# Altium footprint library aksima_footprint.PcbLib: 83 footprints (part 4 of 6)
Each footprint in its own frame and in the unit in brackets; x right, y up, seen from the top. Pads: shape width x height; smd on the part's side, far side on the other; paste and mask are expansions set on the pad; w line width, h text height; cw(c..) or ccw(c..) is an arc to the next point about the centre after c.
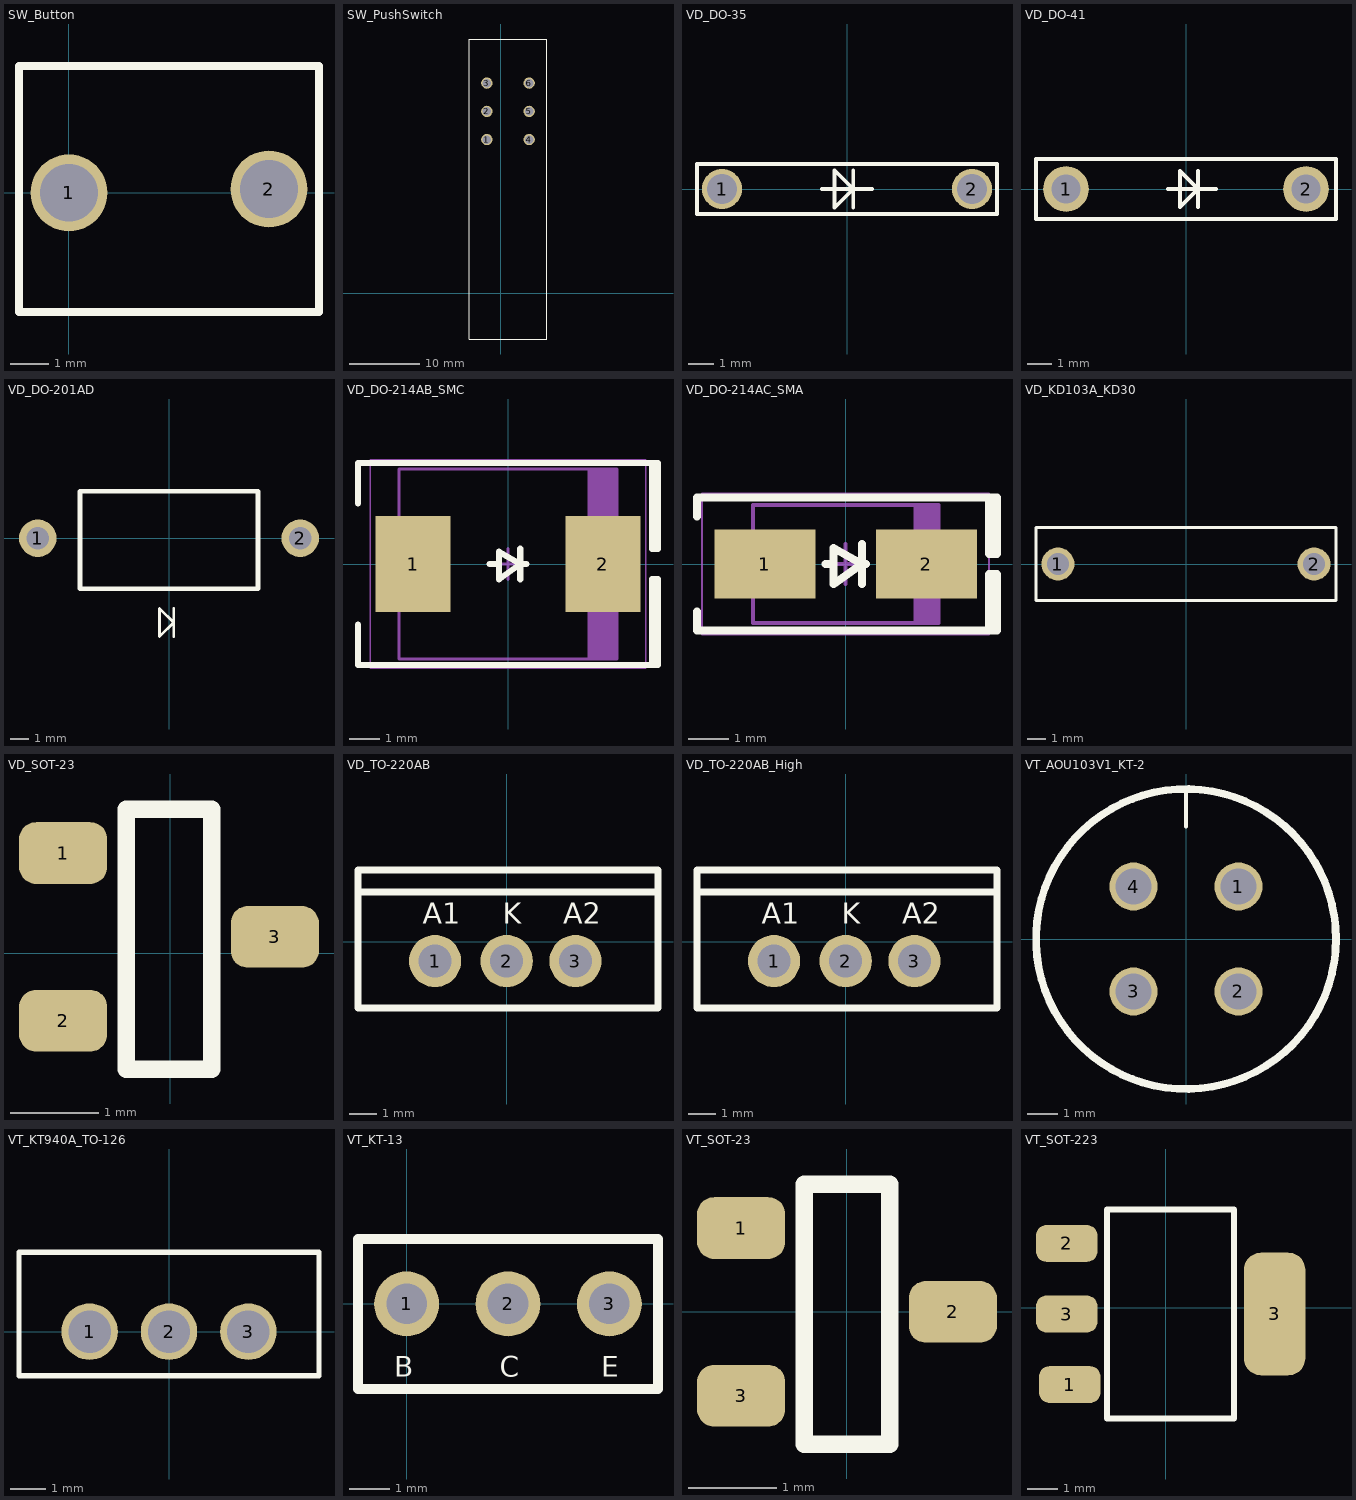
[diagram p3: the footprints below, top view; thin cyan lines are the x and y axes]

## SW_Button [mm] "Switch footprint, button"
pads (2):
  round 2 hole 1.5: 1(0,0) 2(5.2,0.1)
Top Overlay:
  lines w0.2: -1.3,-3.1 -1.3,-0.825 -1.3,0.625 -1.3,3.3 6.5,3.3 6.5,-3.1 -1.3,-3.1

## SW_PushSwitch [mm] "Switch footprint, push switch"
pads (6):
  round 1.6 hole 1.2 unplated: 1(-2,21.75) 2(-2,25.75) 3(-2,29.75) 4(4,21.75) 5(4,25.75) 6(4,29.75)
Top Overlay:
  lines w0.15: -4.5,-6.5 6.5,-6.5 6.5,36 -4.5,36 -4.5,-6.5
3D body "2 - -2.stp": height 12.5, standoff -3, extent -4,-6 6,35.5

## VD_DO-35 [mm] "Diode footprint, DO-35"
pads (2):
  round 1.6 hole 1.2: 1(-5,0) 2(5,0)
Top Overlay:
  lines w0.15: -1,0 1,0 ; 0.25,-0.75 0.25,0.75 ; -6,-1 -6,0 -6,1 6,1 6,-1 -6,-1 ; -0.5,-0.75 -0.5,0.75 0.25,0 -0.5,-0.75 ; -0.5,0 -0.5,0
3D body "DIODE-1N4148.STEP": height 1.85, standoff -2.5, extent -5.31,-0.853 5.31,0.853

## VD_DO-41 [mm] "Diode footprint, DO-41"
pads (2):
  round 1.9 hole 1.2: 1(-5,0) 2(5,0)
Top Overlay:
  lines w0.15: -0.75,0 1.25,0 ; 0.5,-0.75 0.5,0.75 ; -6.25,-1.25 6.25,-1.25 6.25,1.25 -6.25,1.25 -6.25,0.25 -6.25,-1.25 ; -0.25,-0.75 0.5,0 -0.25,0.75 -0.25,-0.75 ; -0.25,0 -0.25,0
3D body "DO-204AL-BK.stp": height 2.8, standoff -2.5, extent -5.48,-1.34 5.48,1.34

## VD_DO-201AD [mm] "Diode footprint, DO-201AD"
pads (2):
  round 2 hole 1.2: 1(-7,0) 2(7,0)
Top Overlay:
  lines w0.15: 0.25,-5.25 0.25,-3.75 ; 0.25,-4.5 -0.5,-5.25 -0.5,-3.75 0.25,-4.5 ; 0.25,-4.5 0.25,-4.5
  lines w0.254: -4.75,-2.7 4.75,-2.7 4.75,2.5 -4.75,2.5 -4.75,-2.7
3D body "DO-201AD.stp": height 5.65, standoff -3.66, extent -7.727,-2.642 7.727,2.642

## VD_DO-214AB_SMC [mm] "Molded Diode, 2-Leads, Body 6.85x5.90mm, IPC Medium Density"
height 2.62
pads (2):
  rect 2.45x3.15 smd: 1(-3.1,0) 2(3.1,0)
Top Overlay:
  lines w0.2: -4.9,-1.975 -4.9,-3.3 4.9,-3.3 4.9,-0.5 4.7,-0.5 4.7,-3.3 ; -4.9,1.975 -4.9,3.3 4.9,3.3 4.9,0.5 4.7,0.5 4.7,3.3 ; -0.6,0 -0.3,0 ; 0.4,-0.5 0.4,0.5 ; 0.6,0 0.4,0 ; 0.4,0 -0.3,0.4 -0.3,-0.5 0.4,0
Mechanical 13:
  rectangle: 2.599,-3.11 3.555,3.11
  lines w0.1: -3.555,-3.11 -3.555,3.11 3.555,3.11 3.555,-3.11 -3.555,-3.11
Mechanical 15:
  lines w0.05: -4.5,-3.4 -4.5,3.4 4.5,3.4 4.5,-3.4 -4.5,-3.4
  lines w0.1: -0.5,0 0.5,0 ; 0,-0.5 0,0.5
3D body "SMC.STEP": height 2.6, standoff 0, extent -3.97,-2.952 3.97,2.952

## VD_DO-214AC_SMA [mm] "Molded Diode, 2-Leads, Body 4.30x2.60mm, IPC Medium Density"
height 2.4
pads (2):
  rect 2.5x1.7 smd: 1(-2,0) 2(2,0)
Top Overlay:
  lines w0.2: -3.683,-1.175 -3.683,-1.651 3.75,-1.651 3.75,-0.254 3.556,-0.254 3.556,-1.651 ; -3.683,1.175 -3.683,1.651 3.75,1.651 3.75,0.254 3.556,0.254 3.556,1.651 ; -0.5,0 -0.3,0 ; 0.4,-0.5 0.4,0.5 ; 0.5,0 0.4,0 ; 0.4,0 -0.3,0.4 -0.3,-0.5 0.4,0
Mechanical 13:
  rectangle: 1.681,-1.46 2.3,1.46
  lines w0.1: -2.3,-1.46 -2.3,1.46 2.3,1.46 2.3,-1.46 -2.3,-1.46
Mechanical 15:
  lines w0.05: -3.556,-1.75 -3.556,1.75 3.556,1.75 3.556,-1.75 -3.556,-1.75
  lines w0.1: -0.5,0 0.5,0 ; 0,-0.5 0,0.5
3D body "SMA.STEP": height 2.4, standoff 0, extent -2.6,-1.375 2.6,1.375

## VD_KD103A_KD30 [mm] "Diode footprint, KD103A KD30"
pads (2):
  round 1.8 hole 1.2: 1(-7,0) 2(7,0)
Top Overlay:
  lines w0.15: -8.2,-2 8.2,-2 8.2,2 -8.2,2 -8.2,-2
3D body "User Library-KD29-C.STEP": height 5.82, standoff -1, extent -7.675,-1.818 7.675,1.818

## VD_SOT-23 [mm] "Dual diode, SOT-23"
pads (3):
  rrect55% 1x0.7 smd: 1(-1.212,1.138) 2(-1.212,-0.762) 3(1.188,0.188)
Top Overlay:
  lines w0.2: -0.495,-1.311 0.471,-1.311 0.471,1.636 -0.495,1.636 -0.495,-1.311
  text "." at -2.146,1.69 h4.5
3D body "SOT23-3.STEP": height 1.29, standoff -0.01, extent -1.412,-1.262 1.388,1.638

## VD_TO-220AB [mm] "Diode footprint, TO-220AB"
pads (3):
  round 1.9 hole 1.2: 1(-2.6,-0.7) 2(0,-0.7) 3(2.5,-0.7)
Top Overlay:
  lines w0.254: -5.4,1.8 5.5,1.8 ; -5.4,-2.4 -5.4,2.6 5.5,2.6 5.5,-2.4 -5.4,-2.4
  text "K" at -0.146,0.654 h0.75
  text "A2" at 2.054,0.654 h0.75
  text "A1" at -3.046,0.654 h0.75
3D body "TO-220AB.stp": height 21.58, standoff -9.73, extent -5.345,-2.25 5.345,2.56

## VD_TO-220AB_High [mm] "Diode footprint, TO-220AB (HIGH)"
pads (3):
  round 1.9 hole 1.2: 1(-2.6,-0.7) 2(0,-0.7) 3(2.5,-0.7)
Top Overlay:
  lines w0.254: -5.4,1.8 5.5,1.8 ; -5.4,-2.4 5.5,-2.4 5.5,2.6 -5.4,2.6 -5.4,-2.4
  text "A1" at -3.046,0.654 h0.75
  text "A2" at 2.054,0.654 h0.75
  text "K" at -0.146,0.654 h0.75
3D body "TO-220AB.stp": height 28.58, standoff -2.73, extent -5.345,-2.25 5.345,2.56

## VT_AOU103V1_KT-2 [mm] "Transistor footprint, AOU103V1 KT-2"
pads (4):
  round 1.6 hole 1.2 unplated: 1(1.75,1.75) 2(1.75,-1.75) 3(-1.75,-1.75) 4(-1.75,1.75)
Top Overlay:
  circle w0.254: c0,0 r5
  lines w0.15: 0,3.75 0,5
3D body "??-2.STEP": height 6.6, standoff -3, extent -4.7,-4.7 4.7,5.4

## VT_KT940A_TO-126 [mm] "Transistor footprint, KT940A TO-126"
pads (3):
  round 1.6 hole 1.2: 1(-2.25,0) 2(0,0) 3(2.25,0)
Top Overlay:
  lines w0.15: -4.25,-1.25 -4.25,2.25 4.25,2.25 4.25,-1.25 -4.25,-1.25
3D body "TO-126.step": height 13, standoff -14.1, extent -4,-1.1 4,2.15

## VT_KT-13 [mm] "Transistor footprint, KT-13"
pads (3):
  round 1.6 hole 1: 1(0,0) 2(2.5,0) 3(5,0)
Top Overlay:
  lines w0.254: -1.2,-2.1 6.2,-2.1 6.2,1.6 -1.2,1.6 -1.2,-2.1
  text "B" at -0.3,-1.8 h0.5
  text "C" at 2.3,-1.8 h0.5
  text "E" at 4.8,-1.8 h0.5
3D body "KT-13_1.STEP": height 7, standoff -4, extent -1.1,-1.5 6.1,1.5

## VT_SOT-23 [mm] "Transistor, SOT-23"
pads (3):
  rrect55% 1x0.7 smd: 1(-1.2,0.95) 2(1.2,0) 3(-1.2,-0.95)
Top Overlay:
  lines w0.2: -0.483,-1.499 -0.483,1.448 0.483,1.448 0.483,-1.499 -0.483,-1.499
  text "." at -2.134,1.502 h4.5
3D body "SOT23-3.STEP": height 1.29, standoff -0.01, extent -1.4,-1.45 1.4,1.45

## VT_SOT-223 [mm] "Transistor, SOT-223"
pads (4):
  rrect55% 2x1.2 smd: 1(-3.125,-2.5) 2(-3.225,2.1) 3(-3.225,-0.2)
  rrect55% 2x4 smd: 3(3.55,-0.2)
Top Overlay:
  lines w0.2: -1.908,-3.6 2.225,-3.6 2.225,3.2 -1.908,3.2 -1.908,-3.6
  text "." at -3.825,3.154 h4.5
3D body "AMS1117 Sot 223.step": height 1.8, standoff -0.22, extent -3.675,-3.479 3.698,3.021